# Altium footprint library Footprint-Lib-PhilsLab.PcbLib: 352 footprints (part 20 of 22)
Each footprint in its own frame and in the unit in brackets; x right, y up, seen from the top. Pads: shape width x height; smd on the part's side, far side on the other; paste and mask are expansions set on the pad; w line width, h text height; cw(c..) or ccw(c..) is an arc to the next point about the centre after c.
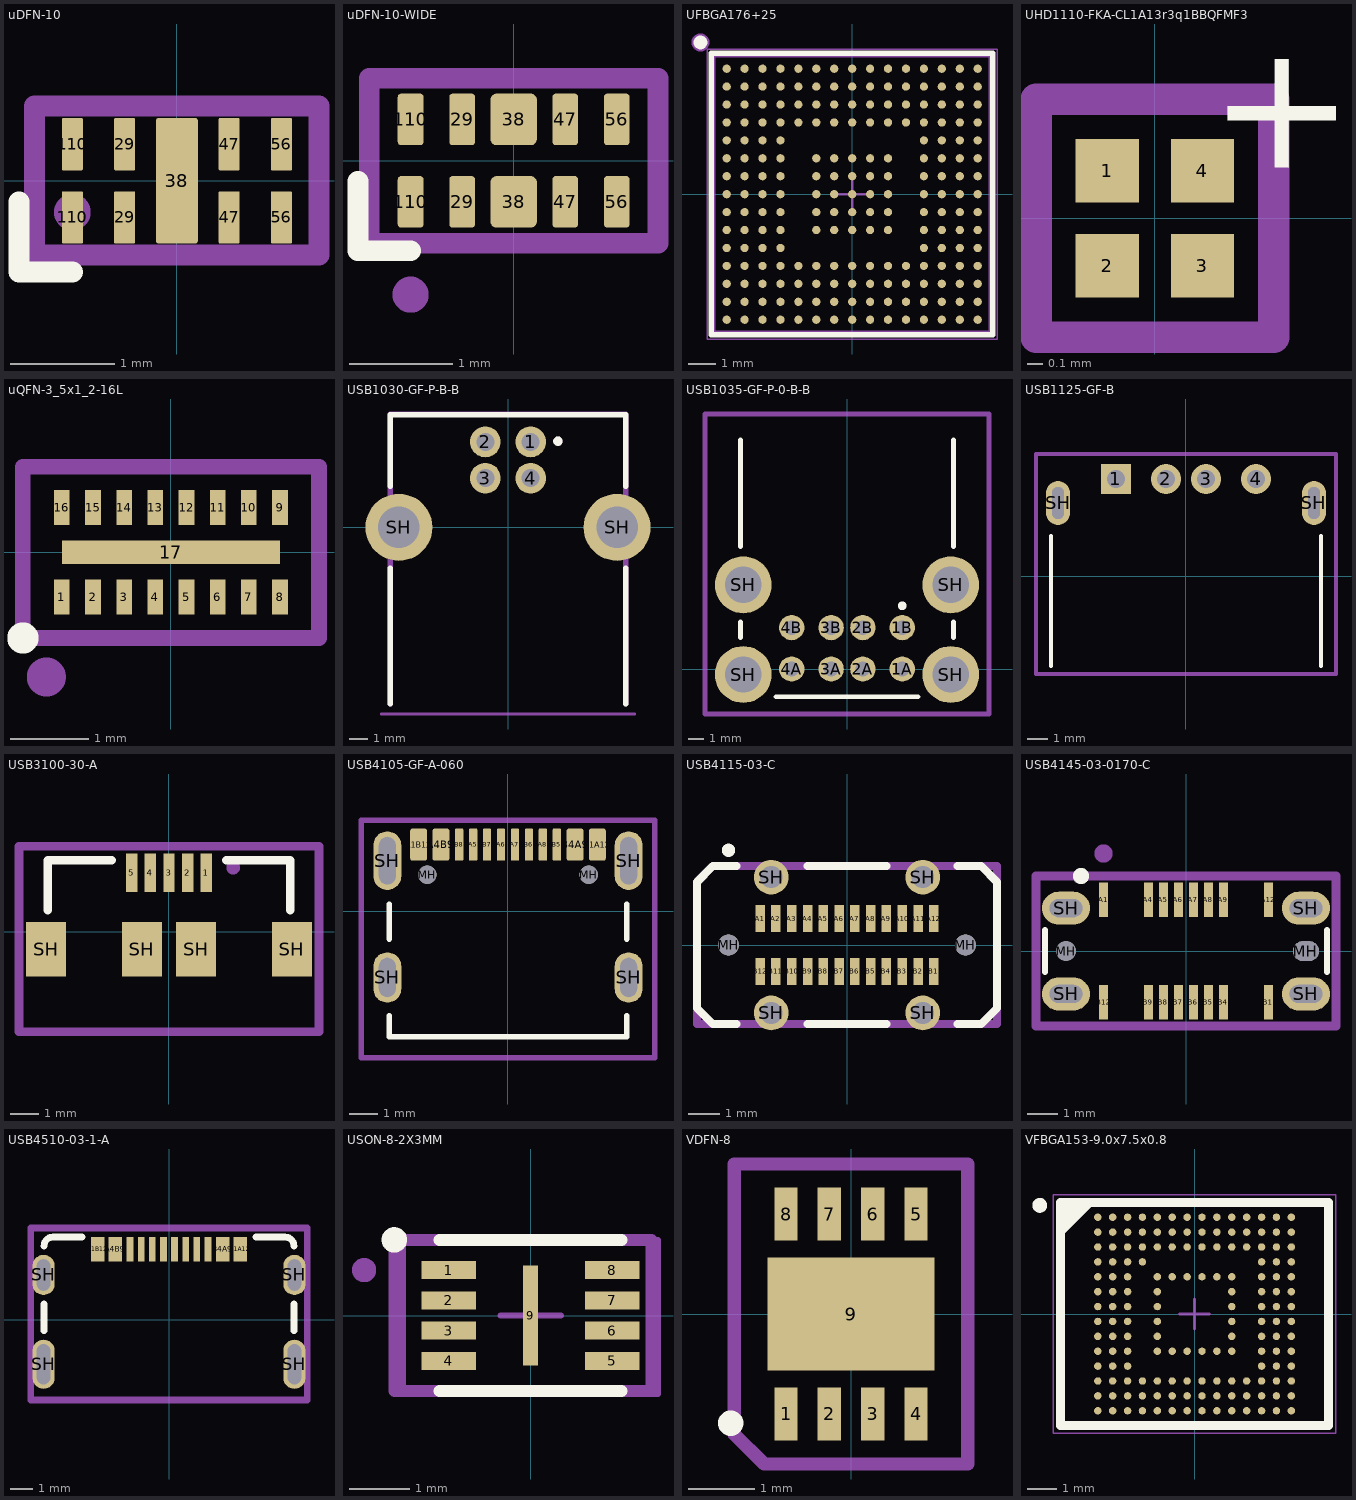
[diagram p19: the footprints below, top view; thin cyan lines are the x and y axes]

## uDFN-10 [mm]
pads (9):
  rrect10% 0.2x0.5 smd mask+0: 29(-0.5,-0.35) 29(-0.5,0.35) 47(0.5,-0.35) 47(0.5,0.35) 56(1,-0.35) 56(1,0.35) 110(-1,-0.35) 110(-1,0.35)
  rrect10% 0.4x1.2 smd mask+0: 38(0,0)
Top Overlay:
  lines w0.2: -1.51,-0.2 -1.51,-0.874 -1,-0.874
Mechanical 13:
  circle w0.25: c-1,-0.3 r0.05
  lines w0.2: -1.362,-0.711 1.359,-0.711 1.359,0.717 -1.362,0.717 -1.362,-0.711
  text "'.Designator'" at -5.84,-0.925 h1
3D body "uDFN-10.step": height 0.47, standoff 0.01, extent -1.25,-0.51 1.25,0.51

## uDFN-10-WIDE [mm]
pads (10):
  rrect25% 0.25x0.5 smd mask+0.02: 29(-0.5,-0.4) 29(-0.5,0.4) 47(0.5,-0.4) 47(0.5,0.4) 56(1,-0.4) 56(1,0.4) 110(-1,-0.4) 110(-1,0.4)
  rrect25% 0.45x0.5 smd mask+0.02: 38(0,-0.4) 38(0,0.4)
Top Overlay:
  lines w0.2: -1.51,-0.2 -1.51,-0.874 -1,-0.874
Mechanical 13:
  circle w0.25: c-1,-1.3 r0.05
  lines w0.2: -1.4,-0.8 1.4,-0.8 1.4,0.8 -1.4,0.8 -1.4,-0.8
  text "'.Designator'" at -5.84,-0.925 h1
3D body "uDFN-10.step": height 0.47, standoff 0.01, extent -1.25,-0.51 1.25,0.51

## UFBGA176+25 [mm]
height 0.6
pads (201):
  round 0.3 smd mask+0.07: A1(-4.55,4.55) A2(-3.9,4.55) A3(-3.25,4.55) A4(-2.6,4.55) A5(-1.95,4.55) A6(-1.3,4.55) A7(-0.65,4.55) A8(0,4.55) A9(0.65,4.55) A10(1.3,4.55) A11(1.95,4.55) A12(2.6,4.55) A13(3.25,4.55) A14(3.9,4.55) A15(4.55,4.55) B1(-4.55,3.9) B2(-3.9,3.9) B3(-3.25,3.9) B4(-2.6,3.9) B5(-1.95,3.9) B6(-1.3,3.9) B7(-0.65,3.9) B8(0,3.9) B9(0.65,3.9) B10(1.3,3.9) B11(1.95,3.9) B12(2.6,3.9) B13(3.25,3.9) B14(3.9,3.9) B15(4.55,3.9) C1(-4.55,3.25) C2(-3.9,3.25) C3(-3.25,3.25) C4(-2.6,3.25) C5(-1.95,3.25) C6(-1.3,3.25) C7(-0.65,3.25) C8(0,3.25) C9(0.65,3.25) C10(1.3,3.25) C11(1.95,3.25) C12(2.6,3.25) C13(3.25,3.25) C14(3.9,3.25) C15(4.55,3.25) D1(-4.55,2.6) D2(-3.9,2.6) D3(-3.25,2.6) D4(-2.6,2.6) D5(-1.95,2.6) D6(-1.3,2.6) D7(-0.65,2.6) D8(0,2.6) D9(0.65,2.6) D10(1.3,2.6) D11(1.95,2.6) D12(2.6,2.6) D13(3.25,2.6) D14(3.9,2.6) D15(4.55,2.6) E1(-4.55,1.95) E2(-3.9,1.95) E3(-3.25,1.95) E4(-2.6,1.95) E12(2.6,1.95) E13(3.25,1.95) E14(3.9,1.95) E15(4.55,1.95) F1(-4.55,1.3) F2(-3.9,1.3) F3(-3.25,1.3) F4(-2.6,1.3) F6(-1.3,1.3) F7(-0.65,1.3) F8(0,1.3) F9(0.65,1.3) F10(1.3,1.3) F12(2.6,1.3) F13(3.25,1.3) F14(3.9,1.3) F15(4.55,1.3) G1(-4.55,0.65) G2(-3.9,0.65) G3(-3.25,0.65) G4(-2.6,0.65) G6(-1.3,0.65) G7(-0.65,0.65) G8(0,0.65) G9(0.65,0.65) G10(1.3,0.65) G12(2.6,0.65) G13(3.25,0.65) G14(3.9,0.65) G15(4.55,0.65) H1(-4.55,0) H2(-3.9,0) H3(-3.25,0) H4(-2.6,0) H6(-1.3,0) H7(-0.65,0) H8(0,0) H9(0.65,0) H10(1.3,0) H12(2.6,0) H13(3.25,0) H14(3.9,0) H15(4.55,0) J1(-4.55,-0.65) J2(-3.9,-0.65) J3(-3.25,-0.65) J4(-2.6,-0.65) J6(-1.3,-0.65) J7(-0.65,-0.65) J8(0,-0.65) J9(0.65,-0.65) J10(1.3,-0.65) J12(2.6,-0.65) J13(3.25,-0.65) J14(3.9,-0.65) J15(4.55,-0.65) K1(-4.55,-1.3) K2(-3.9,-1.3) K3(-3.25,-1.3) K4(-2.6,-1.3) K6(-1.3,-1.3) K7(-0.65,-1.3) K8(0,-1.3) K9(0.65,-1.3) K10(1.3,-1.3) K12(2.6,-1.3) K13(3.25,-1.3) K14(3.9,-1.3) K15(4.55,-1.3) L1(-4.55,-1.95) L2(-3.9,-1.95) L3(-3.25,-1.95) L4(-2.6,-1.95) L12(2.6,-1.95) L13(3.25,-1.95) L14(3.9,-1.95) L15(4.55,-1.95) M1(-4.55,-2.6) M2(-3.9,-2.6) M3(-3.25,-2.6) M4(-2.6,-2.6) M5(-1.95,-2.6) M6(-1.3,-2.6) M7(-0.65,-2.6) M8(0,-2.6) M9(0.65,-2.6) M10(1.3,-2.6) M11(1.95,-2.6) M12(2.6,-2.6) M13(3.25,-2.6) M14(3.9,-2.6) M15(4.55,-2.6) N1(-4.55,-3.25) N2(-3.9,-3.25) N3(-3.25,-3.25) N4(-2.6,-3.25) N5(-1.95,-3.25) N6(-1.3,-3.25) N7(-0.65,-3.25) N8(0,-3.25) N9(0.65,-3.25) N10(1.3,-3.25) N11(1.95,-3.25) N12(2.6,-3.25) N13(3.25,-3.25) N14(3.9,-3.25) N15(4.55,-3.25) P1(-4.55,-3.9) P2(-3.9,-3.9) P3(-3.25,-3.9) P4(-2.6,-3.9) P5(-1.95,-3.9) P6(-1.3,-3.9) P7(-0.65,-3.9) P8(0,-3.9) P9(0.65,-3.9) P10(1.3,-3.9) P11(1.95,-3.9) P12(2.6,-3.9) P13(3.25,-3.9) P14(3.9,-3.9) P15(4.55,-3.9) R1(-4.55,-4.55) R2(-3.9,-4.55) R3(-3.25,-4.55) R4(-2.6,-4.55) R5(-1.95,-4.55) R6(-1.3,-4.55) R7(-0.65,-4.55) R8(0,-4.55) R9(0.65,-4.55) R10(1.3,-4.55) R11(1.95,-4.55) R12(2.6,-4.55) R13(3.25,-4.55) R14(3.9,-4.55) R15(4.55,-4.55)
Top Overlay:
  circle w0.25: c-5.5,5.5 r0.125
  lines w0.2: -5.1,-5.1 -5.1,5.1 5.1,5.1 5.1,-5.1 -5.1,-5.1
Mechanical 13:
  circle w0.5: c-5.5,5.5 r0.072
  lines w0.1: -5,-5 -5,5 5,5 5,-5 -5,-5
  text "'.Designator'" at -5.815,-0.9 h1
Mechanical 15:
  lines w0.05: -5.25,-5.25 -5.25,5.25 5.25,5.25 5.25,-5.25 -5.25,-5.25
  lines w0.1: -0.5,0 0.5,0 ; 0,-0.5 0,0.5
3D body "UFBGA176+25.step": height 0.6, standoff 0, extent -5,-5 5,5

## UHD1110-FKA-CL1A13r3q1BBQFMF3 [mm]
pads (4):
  rect 0.4x0.4 smd mask+0.07: 1(-0.3,0.3) 2(-0.3,-0.3) 3(0.3,-0.3) 4(0.3,0.3)
Top Overlay:
  text "+" at 0.342,0.319 h0.8
Mechanical 13:
  lines w0.2: -0.75,-0.75 -0.75,0.75 0.75,0.75 0.75,-0.75 -0.75,-0.75
  text "'.Designator'" at -5.148,-0.75 h0.8
  text "A" at 0.609,0.486 h0.5
3D body "UHD1110-FKA-CL1A13R3Q1BBQFMF3_eec.STEP": height 0.7, standoff 0, extent -0.5,-0.502 0.5,0.5

## uQFN-3_5x1_2-16L [mm]
pads (17):
  rect 0.2x0.45 smd: 1(-1.4,-0.575) 2(-1,-0.575) 3(-0.6,-0.575) 4(-0.2,-0.575) 5(0.2,-0.575) 6(0.6,-0.575) 7(1,-0.575) 8(1.4,-0.575) 9(1.4,0.575) 10(1,0.575) 11(0.6,0.575) 12(0.2,0.575) 13(-0.2,0.575) 14(-0.6,0.575) 15(-1,0.575) 16(-1.4,0.575)
  rect 2.8x0.3 smd: 17(0,0)
Top Overlay:
  circle w0.3: c-1.9,-1.1 r0.05
Mechanical 13:
  circle w0.3: c-1.6,-1.6 r0.1
  lines w0.2: -1.9,-1.1 -1.9,1.1 1.9,1.1 1.9,-1.1 -1.9,-1.1
  text "'.Designator'" at -5.665,-0.417 h1
3D body "EMIF06-MSD02N16.stp": height 0.56, standoff 0.01, extent -1.75,-0.6 1.75,0.6

## USB1030-GF-P-B-B [mm]
pads (6):
  round 1.7 hole 1: 1(1.25,4.71) 2(-1.25,4.71) 3(-1.25,2.71) 4(1.25,2.71)
  round 3.7 hole 2.3: SH(-6.02,0) SH(6.02,0)
Top Overlay:
  circle w0.3: c2.75,4.75 r0.104
  lines w0.3: -6.5,-9.75 -6.5,-2.25 ; -6.5,2.25 -6.5,6.2 6.5,6.2 6.5,2.25 ; 6.5,-9.75 6.5,-2.25
Mechanical 13:
  circle w0.3: c2.75,4.75 r0.099
  lines w0.15: -7,-10.3 7,-10.3
  lines w0.3: -6.5,-9.75 -6.5,6.25 6.5,6.25 6.5,-9.75
  text "'.Designator'" at -5.815,-0.9 h1
  text "PCB EDGE" at -2.032,-10.1 h0.5
3D body "USB1030-15-P-B-B.stp": height 10.96, standoff -3.48, extent -7.067,-10.3 7.043,5.9

## USB1035-GF-P-0-B-B [mm]
pads (12):
  round 1.6 hole 0.92: 1A(3.5,0) 1B(3.5,2.62) 2A(1,0) 2B(1,2.62) 3A(-1,0) 3B(-1,2.62) 4A(-3.5,0) 4B(-3.5,2.62)
  round 3.6 hole 2.3: SH(-6.57,-0.35) SH(-6.57,5.33) SH(6.57,-0.35) SH(6.57,5.33)
Top Overlay:
  circle w0.3: c3.5,4 r0.125
  lines w0.3: -6.75,2 -6.75,3 ; -6.75,7.75 -6.75,14.5 ; -4.5,-1.75 4.5,-1.75 ; 6.75,2 6.75,3 ; 6.75,7.75 6.75,14.5
Mechanical 13:
  circle w0.3: c3.5,4 r0.09
  lines w0.3: -9,-2.85 0,-2.85 9,-2.85 9,16.15 -9,16.15 -9,-2.85
  text "'.Designator'" at -5.665,10.083 h1
3D body "USB1035-15-P-0-B-B.stp": height 16.18, standoff -3.82, extent -7.864,-1.4 7.86,15.6

## USB1125-GF-B [mm]
pads (6):
  rect 1.5x1.5 hole 0.92 mask+0.07: 1(-3.5,4.85)
  round 1.5 hole 0.92 mask+0.07: 2(-1,4.85) 3(1,4.85) 4(3.5,4.85)
  oval 1.2x2.2 hole 0.6 slot 1.6 at 90 deg mask+0.07: SH(-6.4,3.65) SH(6.4,3.65)
Top Overlay:
  lines w0.2: -6.75,-4.5 -6.75,2 ; 6.75,-4.5 6.75,2
Mechanical 13:
  lines w0.2: -7.5,-4.9 -7.5,6.1 7.5,6.1 7.5,-4.9 6.75,-4.9 -6.75,-4.9 -7.5,-4.9
  text "PCB EDGE" at -2.634,-4.725 h0.6
  text "'.Designator'" at -5.84,-0.575 h1
3D body "USB1125-GF-B.stp": height 6.49, standoff -2.52, extent -6.55,-4.9 6.55,5.1

## USB3100-30-A [mm]
pads (9):
  rect 0.4x1.35 smd mask+0.15: 1(1.3,2.063) 2(0.65,2.063) 3(0,2.063) 4(-0.65,2.063) 5(-1.3,2.063)
  rect 1.4x1.9 smd: SH(-4.3,-0.613) SH(4.3,-0.613)
  rect 1.4x1.9 smd mask+0.3: SH(-0.95,-0.613) SH(0.95,-0.613)
Top Overlay:
  lines w0.3: -4.25,0.75 -4.25,2.5 -2,2.5 ; 2,2.5 4.25,2.5 4.25,0.75
Mechanical 13:
  circle w0.254: c2.25,2.25 r0.113
  lines w0.3: -5.25,-3.5 -5.25,3 5.25,3 5.25,-3.5 -5.25,-3.5
  text "'.Designator'" at -5.665,-0.417 h1
3D body "usb3100_30_a.stp": height 2.69, standoff -0.12, extent -4.613,-3.337 4.613,2.163

## USB4105-GF-A-060 [mm]
pads (18):
  rrect25% 0.6x1.15 smd mask+0.05: A1B12(-3.2,2.378) A4B9(-2.4,2.378) B1A12(3.2,2.378) B4A9(2.4,2.378)
  rrect25% 0.3x1.15 smd mask+0.05: A5(-1.25,2.378) A6(-0.25,2.378) A7(0.25,2.378) A8(1.25,2.378) B5(1.75,2.378) B6(0.75,2.378) B7(-0.75,2.378) B8(-1.75,2.378)
  round 0.65 hole 0.65 unplated mask+0.05: MH(-2.89,1.303) MH(2.89,1.303)
  oval 1x1.8 hole 0.6 slot 1.4 at 90 deg: SH(-4.32,-2.377) SH(4.32,-2.377)
  oval 1x2.1 hole 0.6 slot 1.7 at 90 deg: SH(-4.32,1.803) SH(4.32,1.803)
Top Overlay:
  lines w0.2: -4.25,-3.75 -4.25,-4.5 4.25,-4.5 4.25,-3.75 ; -4.25,-1 -4.25,0.25 ; 4.25,-1 4.25,0.25
Mechanical 13:
  lines w0.2: -5.25,-5.25 -5.25,-3 -5.25,3.25 5.25,3.25 5.25,-5.25 -5.25,-5.25
  text "'.Designator'" at -5.84,-0.925 h1
3D body "USB4105-GF-A-060.stp": height 3.27, standoff -0.61, extent -4.47,-4.972 4.47,2.728

## USB4115-03-C [mm]
pads (30):
  rect 0.3x0.85 smd: A1(-2.75,0.835) A2(-2.25,0.835) A3(-1.75,0.835) A4(-1.25,0.835) A5(-0.75,0.835) A6(-0.25,0.835) A7(0.25,0.835) A8(0.75,0.835) A9(1.25,0.835) A10(1.75,0.835) A11(2.25,0.835) A12(2.75,0.835) B1(2.75,-0.835) B2(2.25,-0.835) B3(1.75,-0.835) B4(1.25,-0.835) B5(0.75,-0.835) B6(0.25,-0.835) B7(-0.25,-0.835) B8(-0.75,-0.835) B9(-1.25,-0.835) B10(-1.75,-0.835) B11(-2.25,-0.835) B12(-2.75,-0.835)
  round 0.66 hole 0.66 unplated: MH(-3.75,0) MH(3.75,0)
  round 1.1 hole 0.7: SH(-2.4,-2.15) SH(-2.4,2.15) SH(2.4,-2.15) SH(2.4,2.15)
Top Overlay:
  circle w0.254: c-3.75,3 r0.082
  lines w0.254: -3.5,-2.5 -4.25,-2.5 -4.75,-2 -4.75,2 -4.25,2.5 -3.5,2.5 ; -1.25,-2.5 1.25,-2.5 ; -1.25,2.5 1.25,2.5 ; 3.5,-2.5 4.25,-2.5 4.75,-2 4.75,2 4.25,2.5 3.5,2.5
Mechanical 13:
  lines w0.254: -4.75,-2.5 4.75,-2.5 4.75,2.5 -4.25,2.5 -4.75,2 -4.75,-2.5
  text "'.Designator'" at -5.665,-0.417 h1
3D body "USB4115-03-C.stp": height 9.33, standoff -1.07, extent -4.47,-2.3 4.47,2.3

## USB4145-03-0170-C [mm]
pads (22):
  rect 0.3x1.15 smd: A1(-2.75,1.71) A4(-1.25,1.71) A5(-0.75,1.71) A6(-0.25,1.71) A7(0.25,1.71) A8(0.75,1.71) A9(1.25,1.71) A12(2.75,1.71) B1(2.75,-1.71) B4(1.25,-1.71) B5(0.75,-1.71) B6(0.25,-1.71) B7(-0.25,-1.71) B8(-0.75,-1.71) B9(-1.25,-1.71) B12(-2.75,-1.71)
  round 0.66 hole 0.66 unplated: MH(-4,0)
  oval 0.86x0.66 hole 0.66 slot 0.86 at 0 deg unplated: MH(4,0)
  oval 1.6x1.1 hole 0.6 slot 1.1 at 0 deg: SH(-4,-1.43) SH(-4,1.43) SH(4,-1.43) SH(4,1.43)
Top Overlay:
  circle w0.5: c-3.5,2.5 r0.022
  lines w0.2: -4.7,-0.7 -4.7,0.7 ; 4.7,-0.7 4.7,0.7
Mechanical 13:
  circle w0.5: c-2.75,3.25 r0.055
  lines w0.3: -5,-2.5 -5,2.5 5,2.5 5,-2.5 -5,-2.5
  text "'.Designator'" at -5.815,-0.9 h1
3D body "USB4145-03-0170-C.stp": height 7.47, standoff -1.69, extent -4.47,-1.855 4.475,1.835

## USB4510-03-1-A [mm]
pads (16):
  rect 0.6x1.1 smd: A1B12(-3.2,3.15) A4B9(-2.4,3.15) B1A12(3.2,3.15) B4A9(2.4,3.15)
  rect 0.3x1.1 smd: A5(-1.25,3.15) A6(-0.25,3.15) A7(0.25,3.15) A8(1.25,3.15) B5(1.75,3.15) B6(0.75,3.15) B7(-0.75,3.15) B8(-1.75,3.15)
  oval 1x2.2 hole 0.6 slot 1.8 at 90 deg: SH(-5.62,-2) SH(5.62,-2)
  oval 1x1.8 hole 0.6 slot 1.4 at 90 deg: SH(-5.62,2) SH(5.62,2)
Top Overlay:
  lines w0.3: -5.6,-0.5 -5.6,0.7 ; -5.6,3.3 cw(c-5.2,3.3) -5.2,3.7 -3.9,3.7 ; 3.9,3.7 5.2,3.7 cw(c5.2,3.3) 5.6,3.3 ; 5.6,-0.5 5.6,0.7
Mechanical 13:
  lines w0.3: -6.2,-3.6 -6.2,4.1 6.2,4.1 6.2,-3.6 -6.2,-3.6
  text "PCB EDGE" at -1.016,-3.375 h0.25
  text "'.Designator'" at -5.815,-0.9 h1
3D body "USB4510-03-1-A.stp": height 1.57, standoff -1.61, extent -5.77,-4.1 5.77,3.1

## USON-8-2X3MM [mm]
height 0.6
pads (9):
  rect 0.9x0.3 smd mask+0.13: 1(-1.35,0.75) 2(-1.35,0.25) 3(-1.35,-0.25) 4(-1.35,-0.75) 5(1.35,-0.75) 6(1.35,-0.25) 7(1.35,0.25) 8(1.35,0.75)
  rect 0.25x1.65 smd paste-0.1: 9(0,0)
Top Overlay:
  circle w0.22: c-2.25,1.25 r0.1
  lines w0.2: -1.5,-1.25 1.5,-1.25 ; -1.5,1.25 1.5,1.25
Top Paste:
  rectangle: -0.1,-0.8 0.1,0.8
Mechanical 13:
  circle w0.2: c-2.75,0.75 r0.1
  lines w0.2: -2.25,-1.25 2,-1.25 2,1.25 -2.25,1.25 -2.25,-1.25
  text "'.Designator'" at -5.815,-0.9 h1
Mechanical 15:
  lines w0.1: -0.5,0 0.5,0 ; 0,-0.5 0,0.5 ; -2.105,-1.3 2.105,-1.3 2.105,1.25 -2.105,1.25 -2.105,-1.3
3D body "USON_8L_2X3_ISSI.step": height 0.61, standoff 0, extent -1.549,-1.054 1.549,1.054

## VDFN-8 [mm]
pads (9):
  rect 0.35x0.8 smd mask+0.07: 1(-0.975,-1.5) 2(-0.325,-1.5) 3(0.325,-1.5) 4(0.975,-1.5) 5(0.975,1.5) 6(0.325,1.5) 7(-0.325,1.5) 8(-0.975,1.5)
  rect 2.5x1.7 smd mask+0.07: 9(0,0)
Top Overlay:
  circle w0.25: c-1.807,-1.637 r0.065
Mechanical 13:
  lines w0.2: -1.75,-1.802 -1.75,-0.75 -1.75,2.25 1.75,2.25 1.75,-2.25 -1.302,-2.25 -1.75,-1.802
  text "'.Designator'" at -4.682,-0.75 h0.8
3D body "VDFN-8.step": height 0.9, standoff 0, extent -1.495,-1.5 1.495,1.5

## VFBGA153-9.0x7.5x0.8 [mm]
height 0.8
pads (153):
  round 0.25 smd mask+0.03: A1(-3.25,3.25) A2(-2.75,3.25) A3(-2.25,3.25) A4(-1.75,3.25) A5(-1.25,3.25) A6(-0.75,3.25) A7(-0.25,3.25) A8(0.25,3.25) A9(0.75,3.25) A10(1.25,3.25) A11(1.75,3.25) A12(2.25,3.25) A13(2.75,3.25) A14(3.25,3.25) B1(-3.25,2.75) B2(-2.75,2.75) B3(-2.25,2.75) B4(-1.75,2.75) B5(-1.25,2.75) B6(-0.75,2.75) B7(-0.25,2.75) B8(0.25,2.75) B9(0.75,2.75) B10(1.25,2.75) B11(1.75,2.75) B12(2.25,2.75) B13(2.75,2.75) B14(3.25,2.75) C1(-3.25,2.25) C2(-2.75,2.25) C3(-2.25,2.25) C4(-1.75,2.25) C5(-1.25,2.25) C6(-0.75,2.25) C7(-0.25,2.25) C8(0.25,2.25) C9(0.75,2.25) C10(1.25,2.25) C11(1.75,2.25) C12(2.25,2.25) C13(2.75,2.25) C14(3.25,2.25) D1(-3.25,1.75) D2(-2.75,1.75) D3(-2.25,1.75) D4(-1.75,1.75) D12(2.25,1.75) D13(2.75,1.75) D14(3.25,1.75) E1(-3.25,1.25) E2(-2.75,1.25) E3(-2.25,1.25) E5(-1.25,1.25) E6(-0.75,1.25) E7(-0.25,1.25) E8(0.25,1.25) E9(0.75,1.25) E10(1.25,1.25) E12(2.25,1.25) E13(2.75,1.25) E14(3.25,1.25) F1(-3.25,0.75) F2(-2.75,0.75) F3(-2.25,0.75) F5(-1.25,0.75) F10(1.25,0.75) F12(2.25,0.75) F13(2.75,0.75) F14(3.25,0.75) G1(-3.25,0.25) G2(-2.75,0.25) G3(-2.25,0.25) G5(-1.25,0.25) G10(1.25,0.25) G12(2.25,0.25) G13(2.75,0.25) G14(3.25,0.25) H1(-3.25,-0.25) H2(-2.75,-0.25) H3(-2.25,-0.25) H5(-1.25,-0.25) H10(1.25,-0.25) H12(2.25,-0.25) H13(2.75,-0.25) H14(3.25,-0.25) J1(-3.25,-0.75) J2(-2.75,-0.75) J3(-2.25,-0.75) J5(-1.25,-0.75) J10(1.25,-0.75) J12(2.25,-0.75) J13(2.75,-0.75) J14(3.25,-0.75) K1(-3.25,-1.25) K2(-2.75,-1.25) K3(-2.25,-1.25) K5(-1.25,-1.25) K6(-0.75,-1.25) K7(-0.25,-1.25) K8(0.25,-1.25) K9(0.75,-1.25) K10(1.25,-1.25) K12(2.25,-1.25) K13(2.75,-1.25) K14(3.25,-1.25) L1(-3.25,-1.75) L2(-2.75,-1.75) L3(-2.25,-1.75) L12(2.25,-1.75) L13(2.75,-1.75) L14(3.25,-1.75) M1(-3.25,-2.25) M2(-2.75,-2.25) M3(-2.25,-2.25) M4(-1.75,-2.25) M5(-1.25,-2.25) M6(-0.75,-2.25) M7(-0.25,-2.25) M8(0.25,-2.25) M9(0.75,-2.25) M10(1.25,-2.25) M11(1.75,-2.25) M12(2.25,-2.25) M13(2.75,-2.25) M14(3.25,-2.25) N1(-3.25,-2.75) N2(-2.75,-2.75) N3(-2.25,-2.75) N4(-1.75,-2.75) N5(-1.25,-2.75) N6(-0.75,-2.75) N7(-0.25,-2.75) N8(0.25,-2.75) N9(0.75,-2.75) N10(1.25,-2.75) N11(1.75,-2.75) N12(2.25,-2.75) N13(2.75,-2.75) N14(3.25,-2.75) P1(-3.25,-3.25) P2(-2.75,-3.25) P3(-2.25,-3.25) P4(-1.75,-3.25) P5(-1.25,-3.25) P6(-0.75,-3.25) P7(-0.25,-3.25) P8(0.25,-3.25) P9(0.75,-3.25) P10(1.25,-3.25) P11(1.75,-3.25) P12(2.25,-3.25) P13(2.75,-3.25) P14(3.25,-3.25)
Top Overlay:
  circle w0.25: c-5.2,3.65 r0.125
  region: -3.521,3.75 -4.5,2.771 -4.5,3.75
  lines w0.3: -4.5,2.771 -3.521,3.75 ; -4.5,-3.75 -4.5,3.75 4.5,3.75 4.5,-3.75 -4.5,-3.75
Mechanical 13:
  lines w0.1: -4.5,-3.75 -4.5,3.75 4.5,3.75 4.5,-3.75 -4.5,-3.75
Mechanical 15:
  lines w0.05: -4.75,-4 -4.75,4 4.75,4 4.75,-4 -4.75,-4
  lines w0.1: -0.5,0 0.5,0 ; 0,-0.5 0,0.5
3D body "VFBGA153-9.0x7.5x0.8.step": height 0.8, standoff 0, extent -4.5,-3.75 4.5,3.75